# Altium footprint library Footprints.PcbLib: 320 footprints (part 10 of 20)
Each footprint in its own frame and in the unit in brackets; x right, y up, seen from the top. Pads: shape width x height; smd on the part's side, far side on the other; paste and mask are expansions set on the pad; w line width, h text height; cw(c..) or ccw(c..) is an arc to the next point about the centre after c.
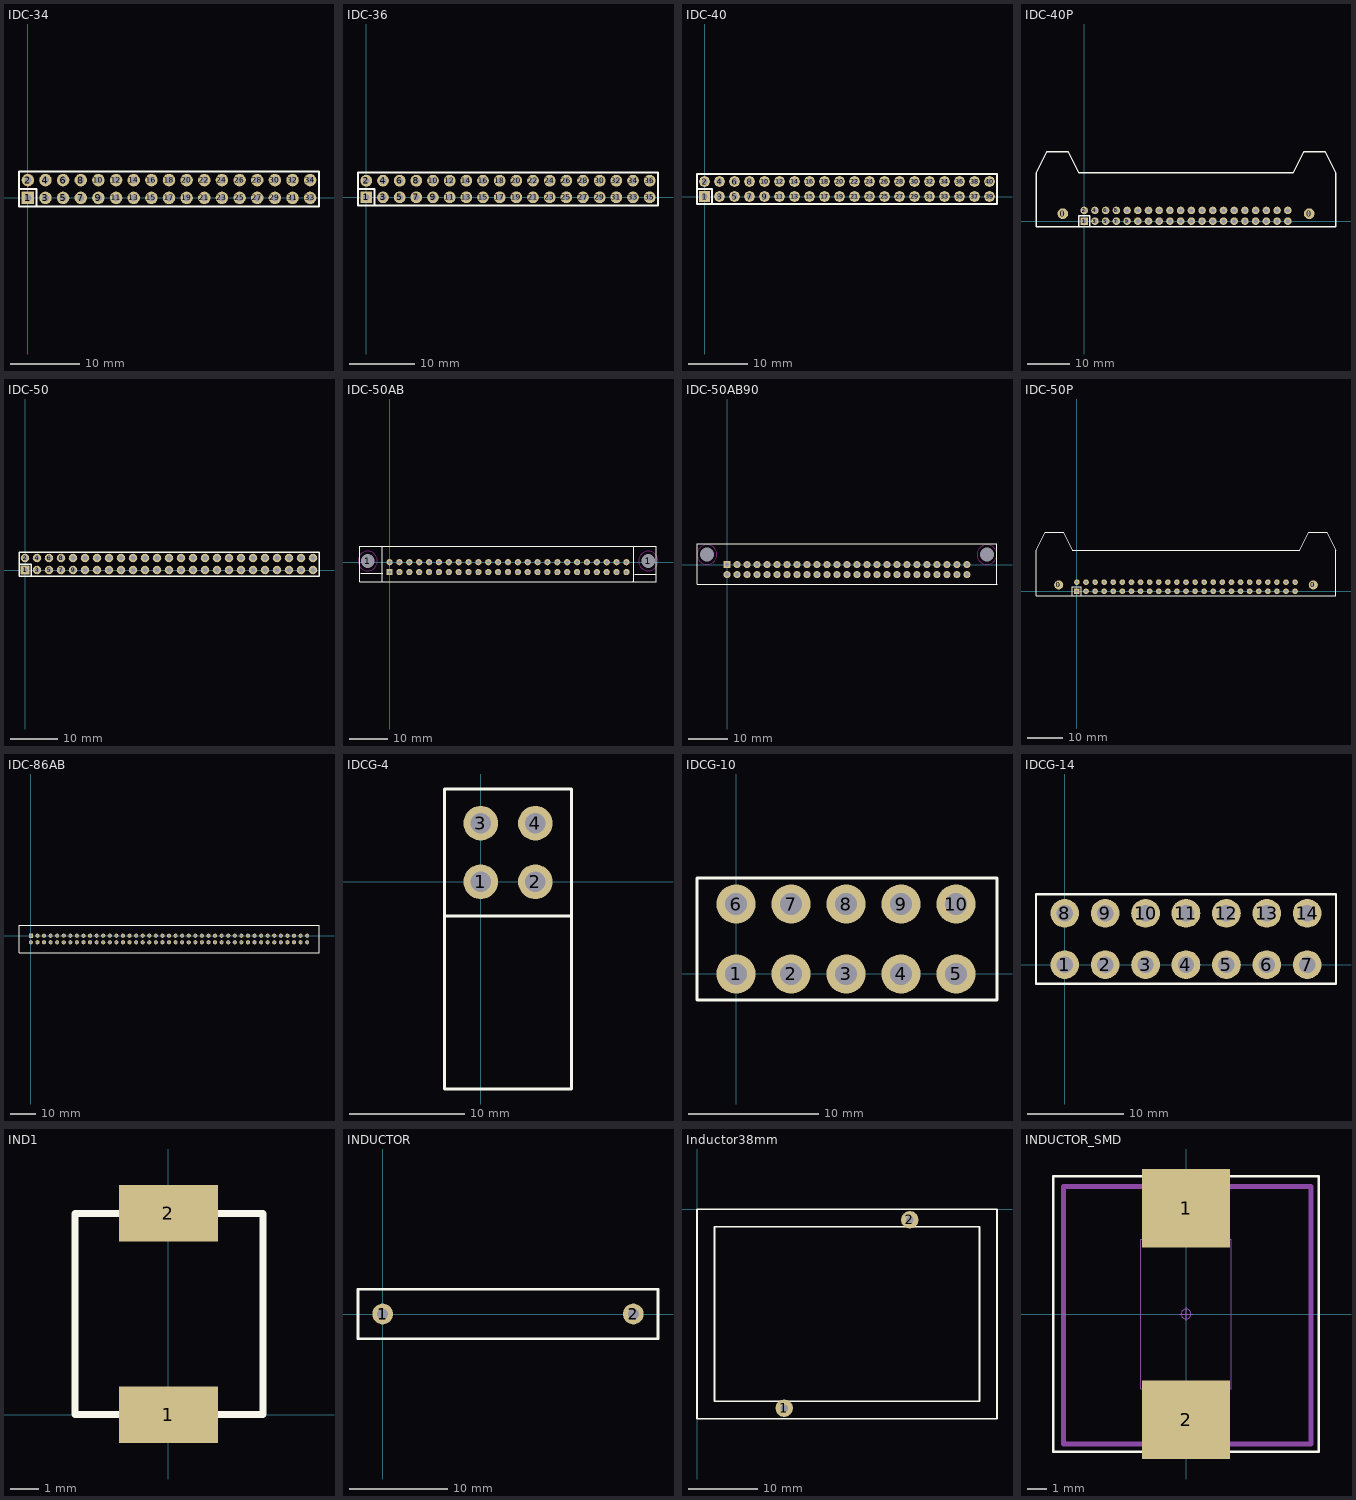
[diagram p9: the footprints below, top view; thin cyan lines are the x and y axes]

## IDC-34 [mm]
pads (34):
  rect 1.8x1.8 hole 1: 1(0,0)
  round 1.8 hole 1: 2(0,2.54) 3(2.54,0) 4(2.54,2.54) 5(5.08,0) 6(5.08,2.54) 7(7.62,0) 8(7.62,2.54) 9(10.16,0) 10(10.16,2.54) 11(12.7,0) 12(12.7,2.54) 13(15.24,0) 14(15.24,2.54) 15(17.78,0) 16(17.78,2.54) 17(20.32,0) 18(20.32,2.54) 19(22.86,0) 20(22.86,2.54) 21(25.4,0) 22(25.4,2.54) 23(27.94,0) 24(27.94,2.54) 25(30.48,0) 26(30.48,2.54) 27(33.02,0) 28(33.02,2.54) 29(35.56,0) 30(35.56,2.54) 31(38.1,0) 32(38.1,2.54) 33(40.64,0) 34(40.64,2.54)
Top Overlay:
  lines w0.305: -1.27,1.27 1.27,1.27 1.27,-1.27 ; -1.27,-1.27 41.91,-1.27 41.91,3.81 -1.27,3.81 -1.27,-1.27

## IDC-36 [mm]
pads (36):
  rect 1.8x1.8 hole 1: 1(0,0)
  round 1.8 hole 1: 2(0,2.54) 3(2.54,0) 4(2.54,2.54) 5(5.08,0) 6(5.08,2.54) 7(7.62,0) 8(7.62,2.54) 9(10.16,0) 10(10.16,2.54) 11(12.7,0) 12(12.7,2.54) 13(15.24,0) 14(15.24,2.54) 15(17.78,0) 16(17.78,2.54) 17(20.32,0) 18(20.32,2.54) 19(22.86,0) 20(22.86,2.54) 21(25.4,0) 22(25.4,2.54) 23(27.94,0) 24(27.94,2.54) 25(30.48,0) 26(30.48,2.54) 27(33.02,0) 28(33.02,2.54) 29(35.56,0) 30(35.56,2.54) 31(38.1,0) 32(38.1,2.54) 33(40.64,0) 34(40.64,2.54) 35(43.18,0) 36(43.18,2.54)
Top Overlay:
  lines w0.305: -1.27,1.27 1.27,1.27 1.27,-1.27 ; -1.27,-1.27 44.45,-1.27 44.45,3.81 -1.27,3.81 -1.27,-1.27

## IDC-40 [mm]
pads (40):
  rect 1.8x1.8 hole 1: 1(0,0)
  round 1.8 hole 1: 2(0,2.54) 3(2.54,0) 4(2.54,2.54) 5(5.08,0) 6(5.08,2.54) 7(7.62,0) 8(7.62,2.54) 9(10.16,0) 10(10.16,2.54) 11(12.7,0) 12(12.7,2.54) 13(15.24,0) 14(15.24,2.54) 15(17.78,0) 16(17.78,2.54) 17(20.32,0) 18(20.32,2.54) 19(22.86,0) 20(22.86,2.54) 21(25.4,0) 22(25.4,2.54) 23(27.94,0) 24(27.94,2.54) 25(30.48,0) 26(30.48,2.54) 27(33.02,0) 28(33.02,2.54) 29(35.56,0) 30(35.56,2.54) 31(38.1,0) 32(38.1,2.54) 33(40.64,0) 34(40.64,2.54) 35(43.18,0) 36(43.18,2.54) 37(45.72,0) 38(45.72,2.54) 39(48.26,0) 40(48.26,2.54)
Top Overlay:
  lines w0.305: -1.27,1.27 1.27,1.27 1.27,-1.27 ; -1.27,-1.27 -1.27,3.81 49.53,3.81 49.53,-1.27 -1.27,-1.27

## IDC-40P [mm]
pads (42):
  round 2.54 hole 0.711: 0(-5.08,1.778) 0(53.34,1.778)
  rect 1.8x1.8 hole 1: 1(0,0)
  round 1.8 hole 1: 2(0,2.54) 3(2.54,0) 4(2.54,2.54) 5(5.08,0) 6(5.08,2.54) 7(7.62,0) 8(7.62,2.54) 9(10.16,0) 10(10.16,2.54) 11(12.7,0) 12(12.7,2.54) 13(15.24,0) 14(15.24,2.54) 15(17.78,0) 16(17.78,2.54) 17(20.32,0) 18(20.32,2.54) 19(22.86,0) 20(22.86,2.54) 21(25.4,0) 22(25.4,2.54) 23(27.94,0) 24(27.94,2.54) 25(30.48,0) 26(30.48,2.54) 27(33.02,0) 28(33.02,2.54) 29(35.56,0) 30(35.56,2.54) 31(38.1,0) 32(38.1,2.54) 33(40.64,0) 34(40.64,2.54) 35(43.18,0) 36(43.18,2.54) 37(45.72,0) 38(45.72,2.54) 39(48.26,0) 40(48.26,2.54)
Top Overlay:
  lines w0.305: -1.27,-1.27 -1.27,1.27 1.27,1.27 1.27,-1.27 ; -11.43,-1.27 -11.43,11.43 -8.89,16.51 -3.81,16.51 -1.27,11.43 49.53,11.43 52.07,16.51 57.15,16.51 59.69,11.43 59.69,-1.27 -11.43,-1.27

## IDC-50 [mm]
pads (50):
  rect 1.8x1.8 hole 1: 1(0,0)
  round 1.8 hole 1: 2(0,2.54) 3(2.54,0) 4(2.54,2.54) 5(5.08,0) 6(5.08,2.54) 7(7.62,0) 8(7.62,2.54) 9(10.16,0) 10(10.16,2.54) 11(12.7,0) 12(12.7,2.54) 13(15.24,0) 14(15.24,2.54) 15(17.78,0) 16(17.78,2.54) 17(20.32,0) 18(20.32,2.54) 19(22.86,0) 20(22.86,2.54) 21(25.4,0) 22(25.4,2.54) 23(27.94,0) 24(27.94,2.54) 25(30.48,0) 26(30.48,2.54) 27(33.02,0) 28(33.02,2.54) 29(35.56,0) 30(35.56,2.54) 31(38.1,0) 32(38.1,2.54) 33(40.64,0) 34(40.64,2.54) 35(43.18,0) 36(43.18,2.54) 37(45.72,0) 38(45.72,2.54) 39(48.26,0) 40(48.26,2.54) 41(50.8,0) 42(50.8,2.54) 43(53.34,0) 44(53.34,2.54) 45(55.88,0) 46(55.88,2.54) 47(58.42,0) 48(58.42,2.54) 49(60.96,0) 50(60.96,2.54)
Top Overlay:
  lines w0.305: -1.27,1.27 1.27,1.27 1.27,-1.27 ; -1.27,-1.27 62.23,-1.27 62.23,3.81 -1.27,3.81 -1.27,-1.27

## IDC-50AB [mm]
pads (52):
  round 3 hole 3.5: 1(-5.63,0.3) 1(66.59,0.3)
  rect 1.6x1.6 hole 0.9: A1(0,-2.54)
  round 1.6 hole 0.9: A2(2.54,-2.54) A3(5.08,-2.54) A4(7.62,-2.54) A5(10.16,-2.54) A6(12.7,-2.54) A7(15.24,-2.54) A8(17.78,-2.54) A9(20.32,-2.54) A10(22.86,-2.54) A11(25.4,-2.54) A12(27.94,-2.54) A13(30.48,-2.54) A14(33.02,-2.54) A15(35.56,-2.54) A16(38.1,-2.54) A17(40.64,-2.54) A18(43.18,-2.54) A19(45.72,-2.54) A20(48.26,-2.54) A21(50.8,-2.54) A22(53.34,-2.54) A23(55.88,-2.54) A24(58.42,-2.54) A25(60.96,-2.54) B1(0,0) B2(2.54,0) B3(5.08,0) B4(7.62,0) B5(10.16,0) B6(12.7,0) B7(15.24,0) B8(17.78,0) B9(20.32,0) B10(22.86,0) B11(25.4,0) B12(27.94,0) B13(30.48,0) B14(33.02,0) B15(35.56,0) B16(38.1,0) B17(40.64,0) B18(43.18,0) B19(45.72,0) B20(48.26,0) B21(50.8,0) B22(53.34,0) B23(55.88,0) B24(58.42,0) B25(60.96,0)
Top Overlay:
  lines w0.254: -7.44,-2.89 -1.94,-2.89 -1.85,-2.98 ; -1.94,-4.69 -1.9,-4.58 ; -1.89,4 -1.87,3.98 -1.87,-5.03 ; 62.68,-4.98 62.78,-4.88 ; 62.8,-5.03 62.8,3.98 62.82,4 ; 63.06,-3.08 68.37,-3.08 68.56,-3.27 ; 68.58,4.03 68.6,4.01 68.6,-5 ; 68.59,-4.99 68.6,-5 ; 68.59,4.09 -7.63,4.09 -7.63,-5 68.6,-5
Keep-Out Layer:
  circle w0.254: c66.59,0.3 r2.5
  circle w0.254: c-5.63,0.3 r2.5

## IDC-50AB90 [mm]
pads (52):
  rect 1.8x1.8 hole 1: A1(0,0)
  round 1.8 hole 1: A2(2.54,0) A3(5.08,0) A4(7.62,0) A5(10.16,0) A6(12.7,0) A7(15.24,0) A8(17.78,0) A9(20.32,0) A10(22.86,0) A11(25.4,0) A12(27.94,0) A13(30.48,0) A14(33.02,0) A15(35.56,0) A16(38.1,0) A17(40.64,0) A18(43.18,0) A19(45.72,0) A20(48.26,0) A21(50.8,0) A22(53.34,0) A23(55.88,0) A24(58.42,0) A25(60.96,0) B1(0,-2.54) B2(2.54,-2.54) B3(5.08,-2.54) B4(7.62,-2.54) B5(10.16,-2.54) B6(12.7,-2.54) B7(15.24,-2.54) B8(17.78,-2.54) B9(20.32,-2.54) B10(22.86,-2.54) B11(25.4,-2.54) B12(27.94,-2.54) B13(30.48,-2.54) B14(33.02,-2.54) B15(35.56,-2.54) B16(38.1,-2.54) B17(40.64,-2.54) B18(43.18,-2.54) B19(45.72,-2.54) B20(48.26,-2.54) B21(50.8,-2.54) B22(53.34,-2.54) B23(55.88,-2.54) B24(58.42,-2.54) B25(60.96,-2.54)
  round 3 hole 3.5: ""(-5.08,2.54) ""(66.04,2.54)
Top Overlay:
  lines w0.254: -7.63,5.29 -7.63,-5 68.6,-5 68.59,-4.99 68.59,5.3 -7.63,5.3
Keep-Out Layer:
  circle w0.254: c-5.08,2.54 r2.5
  circle w0.254: c66.04,2.54 r2.5

## IDC-50P [mil]
pads (52):
  round 100 hole 28: 0(-200,70) 0(2600,70)
  rect 62x62 hole 28: 1(0,0)
  round 62 hole 28: 2(0,100) 3(100,0) 4(100,100) 5(200,0) 6(200,100) 7(300,0) 8(300,100) 9(400,0) 10(400,100) 11(500,0) 12(500,100) 13(600,0) 14(600,100) 15(700,0) 16(700,100) 17(800,0) 18(800,100) 19(900,0) 20(900,100) 21(1000,0) 22(1000,100) 23(1100,0) 24(1100,100) 25(1200,0) 26(1200,100) 27(1300,0) 28(1300,100) 29(1400,0) 30(1400,100) 31(1500,0) 32(1500,100) 33(1600,0) 34(1600,100) 35(1700,0) 36(1700,100) 37(1800,0) 38(1800,100) 39(1900,0) 40(1900,100) 41(2000,0) 42(2000,100) 43(2100,0) 44(2100,100) 45(2200,0) 46(2200,100) 47(2300,0) 48(2300,100) 49(2400,0) 50(2400,100)
Top Overlay:
  lines w12: -50,-50 -50,50 50,50 50,-50 ; -450,-50 -450,450 -350,650 -150,650 -50,450 2450,450 2550,650 2750,650 2850,450 2850,-50 -450,-50

## IDC-86AB [mm]
pads (86):
  rect 1.6x1.6 hole 0.9: A1(0,0)
  round 1.6 hole 0.9: A2(2.54,0) A3(5.08,0) A4(7.62,0) A5(10.16,0) A6(12.7,0) A7(15.24,0) A8(17.78,0) A9(20.32,0) A10(22.86,0) A11(25.4,0) A12(27.94,0) A13(30.48,0) A14(33.02,0) A15(35.56,0) A16(38.1,0) A17(40.64,0) A18(43.18,0) A19(45.72,0) A20(48.26,0) A21(50.8,0) A22(53.34,0) A23(55.88,0) A24(58.42,0) A25(60.96,0) A26(63.5,0) A27(66.04,0) A28(68.58,0) A29(71.12,0) A30(73.66,0) A31(76.2,0) A32(78.74,0) A33(81.28,0) A34(83.82,0) A35(86.36,0) A36(88.9,0) A37(91.44,0) A38(93.98,0) A39(96.52,0) A40(99.06,0) A41(101.6,0) A42(104.14,0) A43(106.68,0) B1(0,-2.54) B2(2.54,-2.54) B3(5.08,-2.54) B4(7.62,-2.54) B5(10.16,-2.54) B6(12.7,-2.54) B7(15.24,-2.54) B8(17.78,-2.54) B9(20.32,-2.54) B10(22.86,-2.54) B11(25.4,-2.54) B12(27.94,-2.54) B13(30.48,-2.54) B14(33.02,-2.54) B15(35.56,-2.54) B16(38.1,-2.54) B17(40.64,-2.54) B18(43.18,-2.54) B19(45.72,-2.54) B20(48.26,-2.54) B21(50.8,-2.54) B22(53.34,-2.54) B23(55.88,-2.54) B24(58.42,-2.54) B25(60.96,-2.54) B26(63.5,-2.54) B27(66.04,-2.54) B28(68.58,-2.54) B29(71.12,-2.54) B30(73.66,-2.54) B31(76.2,-2.54) B32(78.74,-2.54) B33(81.28,-2.54) B34(83.82,-2.54) B35(86.36,-2.54) B36(88.9,-2.54) B37(91.44,-2.54) B38(93.98,-2.54) B39(96.52,-2.54) B40(99.06,-2.54) B41(101.6,-2.54) B42(104.14,-2.54) B43(106.68,-2.54)
Top Overlay:
  lines w0.254: -4.58,-0.95 -4.57,-0.96 -4.57,-6.54 111.25,-6.54 111.25,4 -4.57,4 -4.57,-1

## IDCG-4 [mm]
pads (4):
  round 3 hole 1.8: 1(0,0) 2(4.724,0) 3(0,5.08) 4(4.724,5.08)
Top Overlay:
  lines w0.254: -3.14,-2.96 7.86,-2.96 ; -3.14,-2.96 -3.14,8.04 7.86,8.04 7.86,-2.96 ; -3.14,-2.96 7.86,-2.96 ; -3.14,-2.96 -3.14,-17.96 7.86,-17.96 7.86,-2.96

## IDCG-10 [mm]
pads (10):
  round 3 hole 1.7: 1(0,0) 2(4.216,0) 3(8.432,0) 4(12.648,0) 5(16.864,0) 6(0,5.36) 7(4.216,5.36) 8(8.432,5.36) 9(12.648,5.36) 10(16.864,5.36)
Top Overlay:
  lines w0.254: -3,-2 -3,7.36 20,7.36 20,-2 -3,-2

## IDCG-14 [mm]
pads (14):
  round 3 hole 1.7: 1(0,0) 2(4.216,0) 3(8.432,0) 4(12.648,0) 5(16.864,0) 6(21.08,0) 7(25.296,0) 8(0,5.36) 9(4.216,5.36) 10(8.432,5.36) 11(12.648,5.36) 12(16.864,5.36) 13(21.08,5.36) 14(25.296,5.36)
Top Overlay:
  lines w0.254: -3,-2 28.3,-2 28.3,7.36 -3,7.36 -3,-2

## IND1 [mm]
pads (2):
  rect 3.5x2 smd: 1(0,0) 2(0,7.112)
Top Overlay:
  lines w0.254: 0,0 3.35,0 3.35,7.112 0,7.112 ; 0.048,0 -3.302,0 -3.302,7.112 0.048,7.112

## INDUCTOR [mm]
pads (2):
  round 2.1 hole 1.1: 1(0,0) 2(25.4,0)
Top Overlay:
  lines w0.254: -2.5,-2.5 27.9,-2.5 27.9,2.5 -2.5,2.5 -2.5,-2.5

## Inductor38mm [mm] "Toroide dia-38mm"
pads (2):
  round 2.5 hole 1.1: 1(12.5,-28.5) 2(30.5,-1.5)
Top Overlay:
  lines w0.254: 0,-30 0,0 43,0 43,-30 0,-30 ; 2.5,-27.5 40.5,-27.5 40.5,-2.5 2.5,-2.5 2.5,-27.5

## INDUCTOR_SMD [mm]
pads (2):
  rect 4.5x4 smd: 1(0,5.381) 2(0,-5.381)
Top Overlay:
  lines w0.12: -6.75,-7 -6.75,7 6.75,7 6.75,-7 -6.75,-7
Mechanical 1:
  lines w0.254: -6.223,-6.604 6.35,-6.604 6.35,6.477 -6.223,6.477 -6.223,-6.604
Mechanical 13:
  lines w0.001: -2.3,-3.8 -2.3,3.8 2.3,3.8 2.3,-3.8 -2.3,-3.8
Mechanical 15:
  circle w0.05: c0,0 r0.25
  lines w0.05: -0.35,0 0.35,0 ; 0,-0.35 0,0.35
3D body: height 2.9, standoff 0, extent -6.35,-6.731 6.477,6.604
3D body "INDPM7343X280N.STEP": height 2.8, standoff 0, extent -2.15,-3.65 2.15,3.65
3D body "INDPM7343X280N.STEP": height 2.8, standoff 0, extent -2.15,-6.952 2.15,0.348
3D body "INDPM7343X280N.STEP": height 2.8, standoff 0, extent -2.15,-0.348 2.15,6.952